# Altium footprint library SamacSys.PcbLib: 1008 footprints (part 4 of 63)
Each footprint in its own frame and in the unit in brackets; x right, y up, seen from the top. Pads: shape width x height; smd on the part's side, far side on the other; paste and mask are expansions set on the pad; w line width, h text height; cw(c..) or ccw(c..) is an arc to the next point about the centre after c.
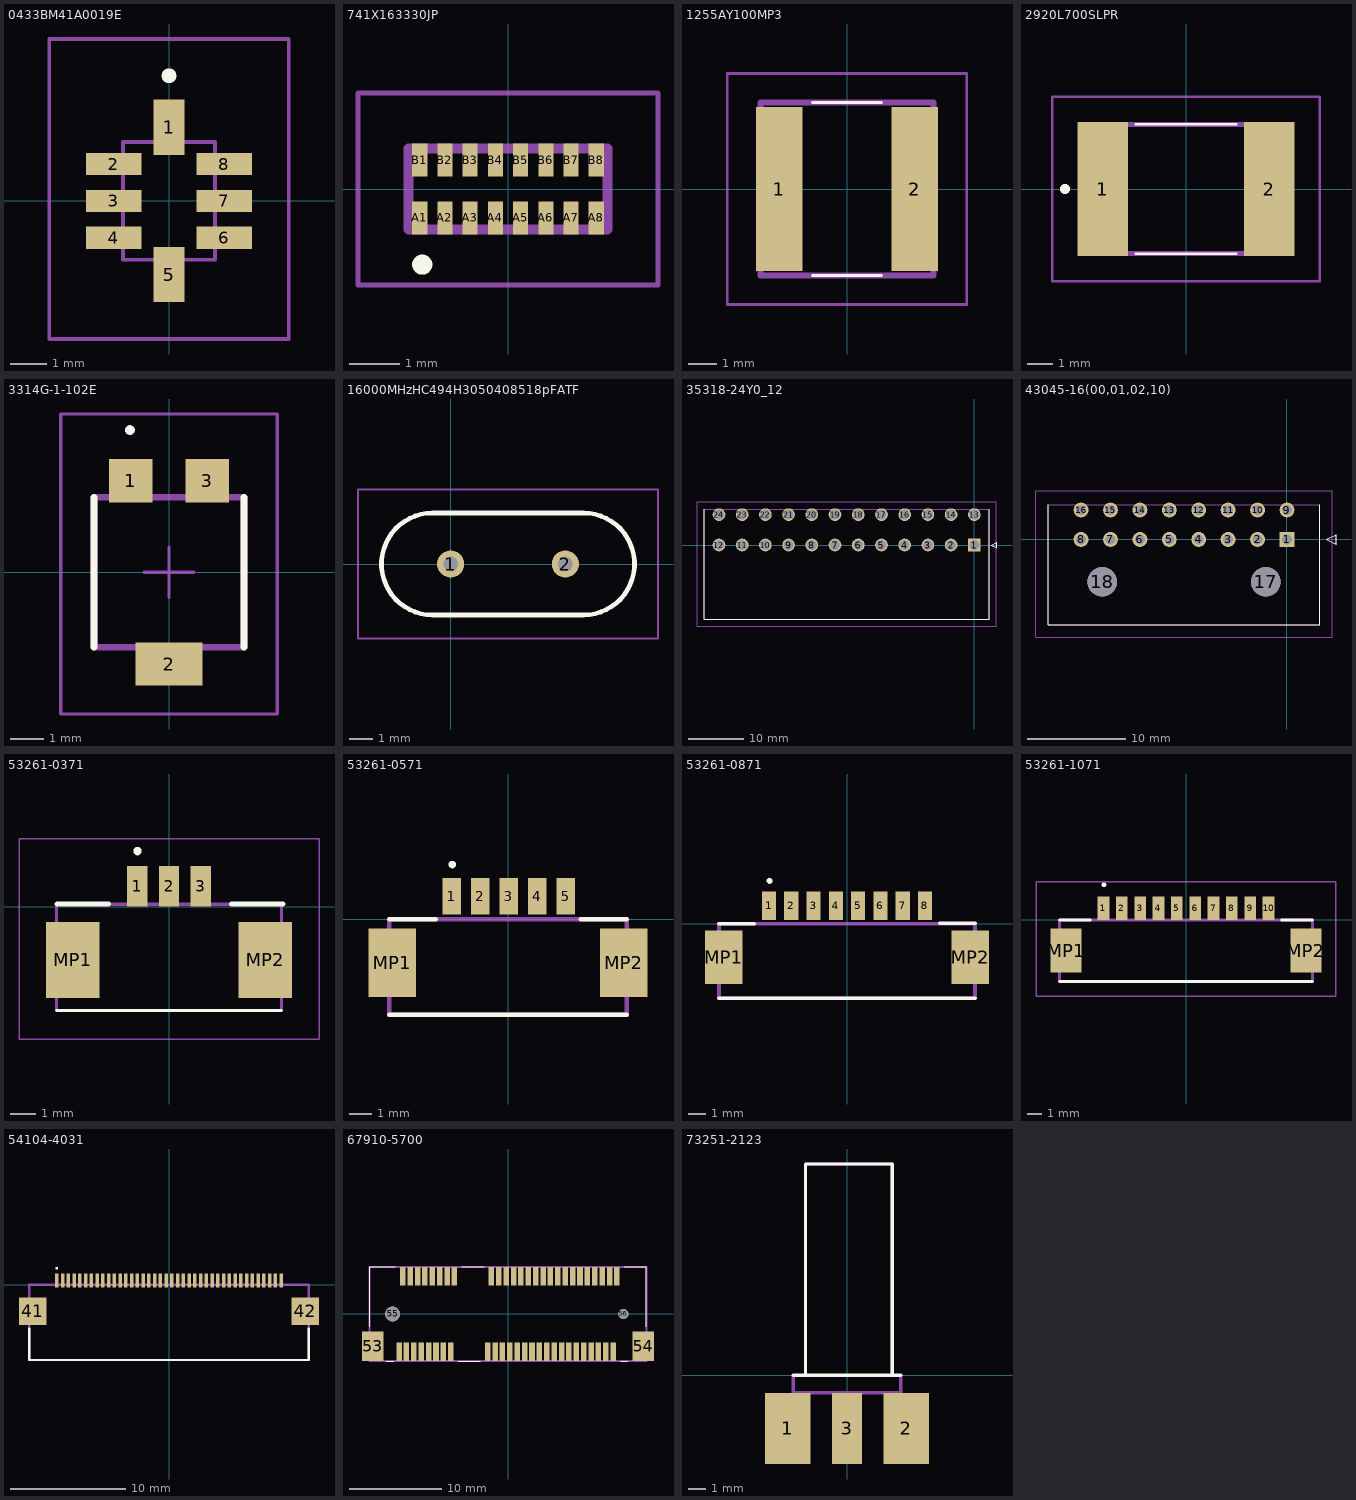
[diagram p3: the footprints below, top view; thin cyan lines are the x and y axes]

## 0433BM41A0019E [mm]
pads (8):
  rect 0.85x1.5 smd: 1(0,2) 5(0,-2)
  rect 1.5x0.6 smd: 2(-1.5,1) 3(-1.5,0) 4(-1.5,-1) 6(1.5,-1) 7(1.5,0) 8(1.5,1)
Top Overlay:
  lines w0.2: 0,3.3 cw(c0,3.4) 0,3.5 cw(c0,3.4) 0,3.3
Assembly:
  lines w0.1: -1.25,-1.6 -1.25,1.6 1.25,1.6 1.25,-1.6 -1.25,-1.6
Countryard:
  lines w0.1: -3.25,-3.75 -3.25,4.4 3.25,4.4 3.25,-3.75 -3.25,-3.75
3D body "0433BM41A0019E.stp": height 1.75, standoff 0, extent -1.25,-1.6 1.25,1.6

## 741X163330JP [mm]
pads (16):
  rect 0.3x0.65 smd: A1(-1.75,-0.575) A2(-1.25,-0.575) A3(-0.75,-0.575) A4(-0.25,-0.575) A5(0.25,-0.575) A6(0.75,-0.575) A7(1.25,-0.575) A8(1.75,-0.575) B1(-1.75,0.575) B2(-1.25,0.575) B3(-0.75,0.575) B4(-0.25,0.575) B5(0.25,0.575) B6(0.75,0.575) B7(1.25,0.575) B8(1.75,0.575)
Top Overlay:
  lines w0.2: -1.7,-1.6 ccw(c-1.7,-1.5) -1.7,-1.4 ; -1.7,-1.6 cw(c-1.7,-1.5) -1.7,-1.4 ; -1.7,-1.6 ccw(c-1.7,-1.5) -1.7,-1.4
Assembly:
  lines w0.2: -1.975,-0.8 -1.975,0.8 1.975,0.8 1.975,-0.8 -1.975,-0.8
Countryard:
  lines w0.1: -2.975,-1.9 -2.975,1.9 2.975,1.9 2.975,-1.9 -2.975,-1.9
3D body "741X163330JP.stp": height 0.65, standoff 0, extent -1.975,-0.87 1.975,0.87

## 1255AY100MP3 [mm]
pads (2):
  rect 1.6x5.7 smd: 1(-2.35,0) 2(2.35,0)
Top Overlay:
  lines w0.1: -1.2,-3 1.2,-3 ; -1.2,3 1.2,3
Assembly:
  lines w0.2: -3,-3 3,-3 3,3 -3,3 -3,-3
Countryard:
  lines w0.1: -4.15,-4 4.15,-4 4.15,4 -4.15,4 -4.15,-4
3D body "1255AY-2R7N=P3.stp": height 4.5, standoff 0, extent -3.15,-3.15 3.15,3.15

## 1901vc [mm]
3D body "Миландр. STEP-модель для корпуса 4229.132-3 формованный.STEP": height 3.55, standoff -0.1, extent -17.1,-17.1 17.1,17.1

## 2920L700SLPR [mm]
pads (2):
  rect 2x5.3 smd: 1(-3.3,0) 2(3.3,0)
Top Overlay:
  lines w0.1: -2,-2.56 2,-2.56 ; -2,2.56 2,2.56
  lines w0.2: -4.8,-0.1 ccw(c-4.8,0) -4.8,0.1 ccw(c-4.8,0) -4.8,-0.1
Assembly:
  lines w0.2: -3.678,-2.56 -3.678,2.56 3.678,2.56 3.678,-2.56 -3.678,-2.56
Countryard:
  lines w0.1: -5.3,-3.65 -5.3,3.65 5.3,3.65 5.3,-3.65 -5.3,-3.65
3D body "2920L600_24SL.stp": height 2.5, standoff 0, extent -3.675,-2.571 3.675,2.571

## 3314G-1-102E [mm]
pads (3):
  rect 1.3x1.3 smd: 1(-1.15,2.75) 3(1.15,2.75)
  rect 2x1.3 smd: 2(0,-2.75)
Top Overlay:
  circle w0.2: c-1.172,4.268 r0.045
  lines w0.2: -2.25,-2.25 -2.25,2.25 ; 2.25,-2.25 2.25,2.25
Top Courtyard:
  lines w0.1: -0.75,0 0.75,0 ; 0,-0.75 0,0.75
Assembly:
  lines w0.2: -2.25,-2.25 2.25,-2.25 2.25,2.25 -2.25,2.25 -2.25,-2.25
Countryard:
  lines w0.1: -3.25,-4.25 -3.25,4.75 3.25,4.75 3.25,-4.25 -3.25,-4.25
3D body "3314G-1-103E.stp": height 2.73, standoff 0, extent -2.5,-3.099 2.5,3.099

## 16000MHzHC494H3050408518pFATF [mm]
pads (2):
  round 1.155 hole 0.63: 1(0,0) 2(4.88,0)
Top Overlay:
  lines w0.2: -0.775,-2.17 cw(c-0.775,0) -0.775,2.17 2.44,2.17 5.655,2.17 cw(c5.655,0) 5.655,-2.17 -0.775,-2.17
Assembly:
  lines w0.1: -0.775,-2.17 cw(c-0.775,0) -0.775,2.17 5.655,2.17 cw(c5.655,0) 5.655,-2.17 -0.775,-2.17
Countryard:
  lines w0.1: -3.945,-3.17 8.825,-3.17 8.825,3.17 -3.945,3.17 -3.945,-3.17
3D body "16.000MHz_HC49_4H_30_50_-40+85_18pF_ATF.stp": height 3.81, standoff -12.87, extent -3.085,-2.325 7.965,2.325

## 35318-24Y0_12 [mm]
pads (24):
  rect 2.3x2.3 hole 1.8: 1(0,0)
  round 2.3 hole 1.8: 2(-4.2,0) 3(-8.4,0) 4(-12.6,0) 5(-16.8,0) 6(-21,0) 7(-25.2,0) 8(-29.4,0) 9(-33.6,0) 10(-37.8,0) 11(-42,0) 12(-46.2,0) 13(0,5.5) 14(-4.2,5.5) 15(-8.4,5.5) 16(-12.6,5.5) 17(-16.8,5.5) 18(-21,5.5) 19(-25.2,5.5) 20(-29.4,5.5) 21(-33.6,5.5) 22(-37.8,5.5) 23(-42,5.5) 24(-46.2,5.5)
Top Overlay:
  lines w0.127: -48.9,6.468 -48.9,-13.468 2.7,-13.468 2.7,6.468 ; 3.1,0 4.1,0.5 4.1,-0.5 3.1,0
Assembly:
  lines w0.127: -48.9,-13.468 -48.9,6.468 2.7,6.468 2.7,-13.468 -48.9,-13.468 ; 3.1,0 4.1,0.5 4.1,-0.5 3.1,0
Countryard:
  lines w0.05: -50.17,-14.738 -50.17,7.869 3.97,7.869 3.97,-14.738 -50.17,-14.738
3D body "35318-2420.stp": height 11.27, standoff -4.13, extent -48.87,-13.88 3.127,6.055

## 43045-16(00,01,02,10) [mm]
pads (18):
  rect 1.52x1.52 hole 1.02: 1(0,0)
  round 1.52 hole 1.02: 2(-3,0) 3(-6,0) 4(-9,0) 5(-12,0) 6(-15,0) 7(-18,0) 8(-21,0) 9(0,3) 10(-3,3) 11(-6,3) 12(-9,3) 13(-12,3) 14(-15,3) 15(-18,3) 16(-21,3)
  round 3 hole 3 unplated: 17(-2.16,-4.32) 18(-18.84,-4.32)
Top Overlay:
  lines w0.127: -24.325,3.52 -24.325,-8.72 3.325,-8.72 3.325,3.52 ; 4,0 5,0.5 5,-0.5 4,0
Assembly:
  lines w0.127: -24.325,-8.72 -24.325,3.52 3.325,3.52 3.325,-8.72 -24.325,-8.72 ; 4,0 5,0.5 5,-0.5 4,0
Countryard:
  lines w0.05: -25.595,-9.99 -25.595,4.979 4.595,4.979 4.595,-9.99 -25.595,-9.99
3D body "43045-1600.stp": height 8.27, standoff -3.68, extent -24.575,-8.925 3.575,3.315

## 53261-0371 [mm]
pads (5):
  rect 0.8x1.6 smd: 1(-1.25,0.8) 2(0,0.8) 3(1.25,0.8)
  rect 2.1x3 smd: MP1(-3.8,-2.1) MP2(3.8,-2.1)
Top Overlay:
  circle w0.2: c-1.244,2.199 r0.066
  lines w0.127: -4.45,-4.1 4.45,-4.1
  lines w0.2: -4.425,0.1 -2.4,0.1 ; 2.475,0.1 4.5,0.1
Assembly:
  lines w0.127: -4.45,-4.1 4.45,-4.1 4.45,0.1 -4.45,0.1 -4.45,-4.1
Countryard:
  lines w0.05: -5.926,-5.227 5.926,-5.227 5.926,2.676 -5.926,2.676 -5.926,-5.227
3D body "532610371.stp": height 3.4, standoff 0, extent -4.45,-4.1 4.45,1.1

## 53261-0571 [mm]
pads (7):
  rect 0.8x1.6 smd: 1(-2.47,1.004) 2(-1.22,1.004) 3(0.03,1.004) 4(1.28,1.004) 5(2.53,1.004)
  rect 2.1x3 smd: MP1(-5.08,-1.905) MP2(5.08,-1.905)
Top Overlay:
  circle w0.2: c-2.444,2.399 r0.066
  lines w0.2: -5.2,-4.2 5.2,-4.2 ; -5.2,0 -3.175,0 ; 3.2,0 5.2,0
Assembly:
  lines w0.2: -5.2,-4.2 -5.2,0 5.2,0 5.2,-4.2 -5.2,-4.2
3D body "53261-0571.stp": height 3.4, standoff 0, extent -5.7,-3.895 5.7,1.305

## 53261-0871 [mm]
pads (10):
  rect 0.8x1.6 smd: 1(-4.375,1.004) 2(-3.125,1.004) 3(-1.875,1.004) 4(-0.625,1.004) 5(0.625,1.004) 6(1.875,1.004) 7(3.125,1.004) 8(4.375,1.004)
  rect 2.1x3 smd: MP1(-6.925,-1.896) MP2(6.925,-1.896)
Top Overlay:
  circle w0.2: c-4.349,2.399 r0.066
  lines w0.2: -7.19,-4.2 7.19,-4.2 ; -7.19,0 -5.2,0 ; 5.215,0.017 7.205,0.017
Assembly:
  lines w0.2: -7.19,-4.2 -7.19,0 7.19,0 7.19,-4.2 -7.19,-4.2
3D body "53261-0871.stp": height 3.4, standoff 0, extent -7.605,-3.815 7.545,1.385

## 53261-1071 [mm]
pads (12):
  rect 0.8x1.6 smd: 1(-5.625,0.8) 2(-4.375,0.8) 3(-3.125,0.8) 4(-1.875,0.8) 5(-0.625,0.8) 6(0.625,0.8) 7(1.875,0.8) 8(3.125,0.8) 9(4.375,0.8) 10(5.625,0.8)
  rect 2.1x3 smd: MP1(-8.175,-2.1) MP2(8.175,-2.1)
Top Overlay:
  circle w0.2: c-5.6,2.4 r0.066
  lines w0.2: -8.625,-4.2 8.625,-4.2 ; -8.625,0 -6.5,0 ; 6.5,0 8.625,0
Assembly:
  lines w0.2: -8.625,-4.2 8.625,-4.2 8.625,0 -8.625,0 -8.625,-4.2
Countryard:
  lines w0.1: -10.225,-5.2 10.225,-5.2 10.225,2.6 -10.225,2.6 -10.225,-5.2
3D body "53261-1071.stp": height 3.41, standoff 0.01, extent -8.845,-4.435 8.805,0.765

## 54104-4031 [mm]
pads (42):
  rect 0.3x1.2 smd: 1(-9.75,0.382) 2(-9.25,0.382) 3(-8.75,0.382) 4(-8.25,0.382) 5(-7.75,0.382) 6(-7.25,0.382) 7(-6.75,0.382) 8(-6.25,0.382) 9(-5.75,0.382) 10(-5.25,0.382) 11(-4.75,0.382) 12(-4.25,0.382) 13(-3.75,0.382) 14(-3.25,0.382) 15(-2.75,0.382) 16(-2.25,0.382) 17(-1.75,0.382) 18(-1.25,0.382) 19(-0.75,0.382) 20(-0.25,0.382) 21(0.25,0.382) 22(0.75,0.382) 23(1.25,0.382) 24(1.75,0.382) 25(2.25,0.382) 26(2.75,0.382) 27(3.25,0.382) 28(3.75,0.382) 29(4.25,0.382) 30(4.75,0.382) 31(5.25,0.382) 32(5.75,0.382) 33(6.25,0.382) 34(6.75,0.382) 35(7.25,0.382) 36(7.75,0.382) 37(8.25,0.382) 38(8.75,0.382) 39(9.25,0.382) 40(9.75,0.382)
  rect 2.4x2.4 smd: 41(-11.85,-2.318) 42(11.85,-2.318)
Top Overlay:
  circle w0.2: c-9.768,1.437 r0.027
  lines w0.2: -12.15,-3.814 -12.15,-6.55 12.15,-6.55 12.15,-3.814
Assembly:
  lines w0.2: -12.15,-6.55 -12.15,0 12.15,0 12.15,-6.55 -12.15,-6.55
3D body "54104-4031.stp": height 2.05, standoff 0, extent -12.75,-4.81 12.75,0.79

## 67910-5700 [mm]
pads (56):
  rect 0.6x2 smd: 1(-11.8,-4.1) 2(-11.4,4.1) 3(-11,-4.1) 4(-10.6,4.1) 5(-10.2,-4.1) 6(-9.8,4.1) 7(-9.4,-4.1) 8(-9,4.1) 9(-8.6,-4.1) 10(-8.2,4.1) 11(-7.8,-4.1) 12(-7.4,4.1) 13(-7,-4.1) 14(-6.6,4.1) 15(-6.2,-4.1) 16(-5.8,4.1) 17(-2.2,-4.1) 18(-1.8,4.1) 19(-1.4,-4.1) 20(-1,4.1) 21(-0.6,-4.1) 22(-0.2,4.1) 23(0.2,-4.1) 24(0.6,4.1) 25(1,-4.1) 26(1.4,4.1) 27(1.8,-4.1) 28(2.2,4.1) 29(2.6,-4.1) 30(3,4.1) 31(3.4,-4.1) 32(3.8,4.1) 33(4.2,-4.1) 34(4.6,4.1) 35(5,-4.1) 36(5.4,4.1) 37(5.8,-4.1) 38(6.2,4.1) 39(6.6,-4.1) 40(7,4.1) 41(7.4,-4.1) 42(7.8,4.1) 43(8.2,-4.1) 44(8.6,4.1) 45(9,-4.1) 46(9.4,4.1) 47(9.8,-4.1) 48(10.2,4.1) 49(10.6,-4.1) 50(11,4.1) 51(11.4,-4.1) 52(11.8,4.1)
  rect 2.3x3.2 smd: 53(-14.65,-3.5) 54(14.65,-3.5)
  round 1.6 hole 1.6 unplated: 55(-12.5,0)
  round 1.1 hole 1.1 unplated: 56(12.5,0)
Top Overlay:
  lines w0.1: -15,-1.4 -15,5.1 -12.2,5.1 ; -13.2,-5.1 -12.4,-5.1 ; -5.4,-5.1 -3,-5.1 ; -5,5.1 -2.6,5.1 ; 12.2,-5.1 13,-5.1 ; 12.6,5.1 15,5.1 15,-1.4
Assembly:
  lines w0.2: -15,-5.1 15,-5.1 15,5.1 -15,5.1 -15,-5.1
3D body "67910-5700.stp": height 5.65, standoff -0.85, extent -15,-5.1 15,5.1

## 73251-2123 [mm]
pads (3):
  rect 2.665x4.19 smd: 1(-3.492,-3.115) 2(3.492,-3.115)
  rect 1.78x4.19 smd: 3(0,-3.115)
Top Overlay:
  lines w0.2: -3.175,0.009 -2.441,0.009 ; 3.175,0.009 2.657,0.009 ; -2.441,0.009 -2.441,12.45 2.657,12.45 2.657,0.009 ; -2.441,0.009 2.657,0.009
Assembly:
  lines w0.2: -2.441,0.009 -2.441,12.45 2.657,12.45 2.657,0.038 ; -3.175,-1.02 -3.175,0 3.175,0 3.175,-1.02 -3.175,-1.02
3D body "73251-2123.stp": height 6.36, standoff 0, extent -3.175,-4.406 3.175,11.85